# Altium integrated library CMI-1614-1285T.IntLib: 1 symbol
Pins are listed as number, name and electrical type; pins without a type are passive.

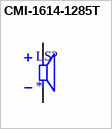
[diagram p0: symbol CMI-1614-1285T]

## CMI-1614-1285T
designator LS?
16 mm, 12 Vdc, 85 dB, Through Hole, Driving Circuit, Magnetic Audio Indicator Buzzer; MF: Same Sky; MP: CMI-1614-1285T; SnapEDA_Link: https://www.snapeda.com/parts/CMI-1614-1285T/Same+Sky/view-part/?ref=snap; Package: CUI Inc.; Value: *; Check_prices: https://www.snapeda.com/parts/CMI-1614-1285T/Same+Sky/view-part/?ref=eda
footprint CUI_CMI-1614-1285T
pins: N, P